# Altium footprint library Radolovic_PCB_Library.PcbLib: 38 footprints (part 1 of 3)
Each footprint in its own frame and in the unit in brackets; x right, y up, seen from the top. Pads: shape width x height; smd on the part's side, far side on the other; paste and mask are expansions set on the pad; w line width, h text height; cw(c..) or ccw(c..) is an arc to the next point about the centre after c.
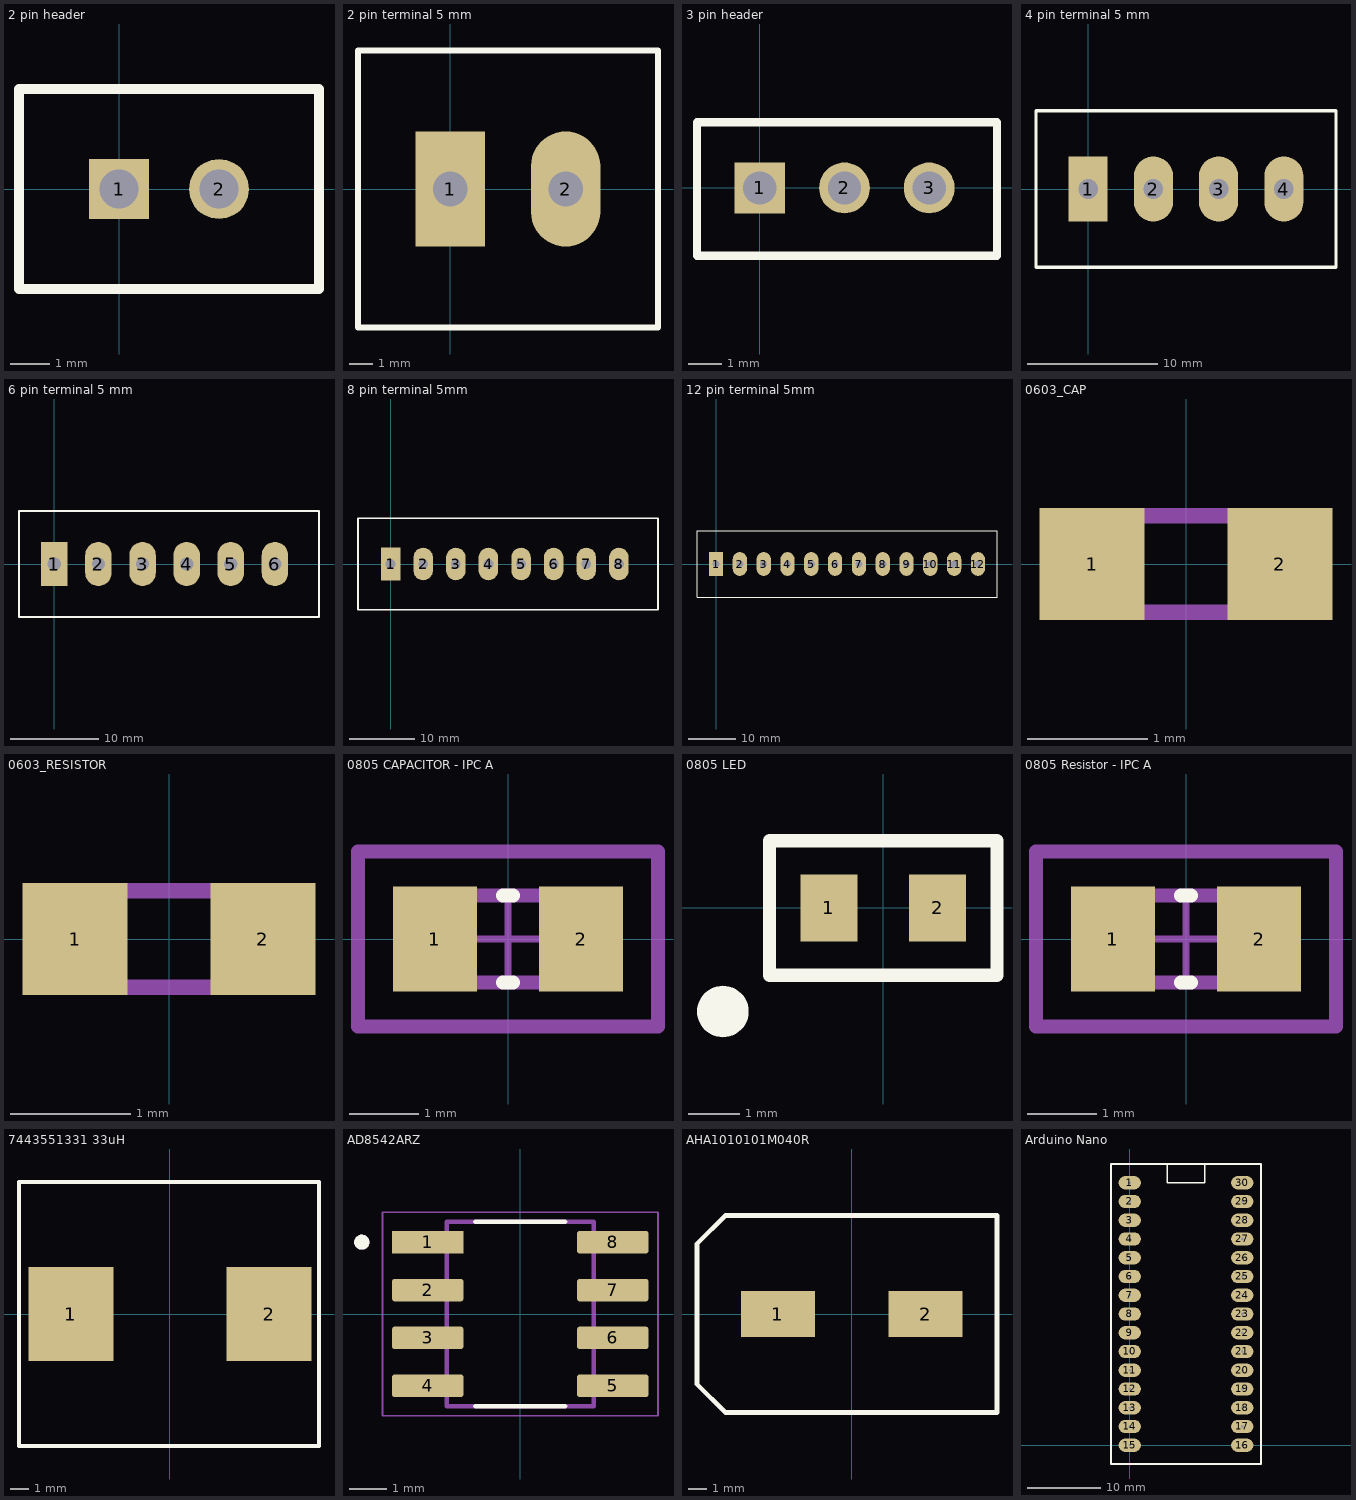
[diagram p0: the footprints below, top view; thin cyan lines are the x and y axes]

## 2 pin header [mil]
pads (2):
  rect 60x60 hole 39.37: 1(0,0)
  round 60 hole 39.37: 2(100,0)
Top Overlay:
  lines w10: -100,-100 200,-100 200,100 -100,100 -100,-100
3D body "MTSW-101-08-S-D-318.stp": height 418, standoff -112, extent -49.8,-49.8 150.2,50.2

## 2 pin terminal 5 mm [mm]
pads (2):
  rect 3x5 hole 1.5: 1(0,0)
  oval 3x5 hole 1.5: 2(5,0)
Top Overlay:
  lines w0.254: -4,-6 -4,6 9,6 9,-6 -4,-6
3D body "TB003-500-P02BE--3DModel-STEP-1.STEP": height 10.3, standoff -4, extent -3.05,-3.8 7.45,4

## 3 pin header [mil]
pads (3):
  rect 60x60 hole 39.37: 1(0,0)
  round 60 hole 39.37: 2(100,0) 3(200,0)
Top Overlay:
  lines w10: -74.02,-80 280,-80 280,77.48 -74.02,77.48 -74.02,-80
3D body "TSW-101-07-T-T.stp": height 37.01, standoff -392.99, extent -50,-50 250,50

## 4 pin terminal 5 mm [mm]
pads (4):
  rect 3x5 hole 1.5: 1(0,0)
  oval 3x5 hole 1.5: 2(5,0) 3(10,0) 4(15,0)
Top Overlay:
  lines w0.254: -4,-6 19,-6 19,6 -4,6 -4,-6

## 6 pin terminal 5 mm [mm] "6 pin terminal block 5 mm"
pads (6):
  rect 3x5 hole 1.5: 1(0,0)
  oval 3x5 hole 1.5: 2(5,0) 3(10,0) 4(15,0) 5(20,0) 6(25,0)
Top Overlay:
  lines w0.254: -4,-6 30,-6 30,6 -4,6 -4,-6
3D body "282856-6--3DModel-STEP-1.STEP": height 19.5, standoff -3, extent -2.55,-5 27.95,5

## 8 pin terminal 5mm [mm] "8 pin terminal block 5 mm"
pads (8):
  rect 3x5 hole 1.5: 1(0,0)
  oval 3x5 hole 1.5: 2(5,0) 3(10,0) 4(15,0) 5(20,0) 6(25,0) 7(30,0) 8(35,0)
Top Overlay:
  lines w0.254: -5,-7 41,-7 41,7 -5,7 -5,-7
3D body "282856-8--3DModel-STEP-1.STEP": height 19.5, standoff -3, extent -2.55,-5 37.95,5

## 12 pin terminal 5mm [mm] "12 pin terminal block 5 mm"
pads (12):
  rect 3x5 hole 1.5: 1(0,0)
  oval 3x5 hole 1.5: 2(5,0) 3(10,0) 4(15,0) 5(20,0) 6(25,0) 7(30,0) 8(35,0) 9(40,0) 10(45,0) 11(50,0) 12(55,0)
Top Overlay:
  lines w0.254: -4,-7 59,-7 59,7 -4,7 -4,-7

## 0603_CAP [mm]
pads (2):
  rect 0.87x0.93 smd: 1(-0.78,0) 2(0.78,0)
Mechanical 13:
  lines w0.127: -0.8,-0.4 -0.8,0.4 0.8,0.4 0.8,-0.4 -0.8,-0.4
3D body "step_temp.STEP": height 0.9, standoff 0, extent -0.8,-0.4 0.8,0.4

## 0603_RESISTOR [mm]
pads (2):
  rect 0.87x0.93 smd: 1(-0.78,0) 2(0.78,0)
Mechanical 13:
  lines w0.127: -0.8,-0.4 -0.8,0.4 0.8,0.4 0.8,-0.4 -0.8,-0.4
3D body "RN73C1J3K01BTG.STEP": height 0.55, standoff 0, extent -0.775,-0.4 0.775,0.4

## 0805 CAPACITOR - IPC A [mil]
pads (2):
  rect 47.5x59.38 smd paste+0: 1(-41.37,0) 2(41.37,0)
Top Overlay:
  lines w7.87: -2.86,-24.61 2.86,-24.61 ; -2.86,24.61 2.86,24.61
Top 3D Body:
  lines w7.87: -39.37,-24.61 -39.37,24.61 39.37,24.61 39.37,-24.61 -39.37,-24.61
Top Courtyard:
  lines w7.87: -84.81,-49.37 -84.81,49.37 84.81,49.37 84.81,-49.37 -84.81,-49.37
Top Assembly:
  lines w7.87: -84.81,-49.37 -84.81,49.37 84.81,49.37 84.81,-49.37 -84.81,-49.37
  text ".Designator" at 0,7.41 h39.37
Top Component Center:
  lines w3.94: -19.68,0 19.68,0 ; 0,-19.68 0,19.68
3D body "GRT21BC8YA225KE13L.STEP": height 48.23, standoff -0.98, extent -39.37,-28.54 39.37,28.54

## 0805 LED [mm] "Wurth Electronics  / 150080VS75000"
pads (3):
  rect 1.1x1.3 smd: 1(-1.05,0) 2(1.05,0)
  round 1 on Top Overlay: ""(-3.1,-2)
Top Overlay:
  lines w0.254: -2.2,-1.3 -2.2,1.3 2.2,1.3 2.2,-1.3 -2.2,-1.3
3D body "598-8160-102F.STEP": height 0.7, standoff 0, extent -1.05,-0.625 0.95,0.625

## 0805 Resistor - IPC A [mil]
pads (2):
  rect 47.5x59.38 smd paste+0: 1(-41.37,0) 2(41.37,0)
Top Overlay:
  lines w7.87: -2.86,-24.61 2.86,-24.61 ; -2.86,24.61 2.86,24.61
Top 3D Body:
  lines w7.87: -39.37,-24.61 39.37,-24.61 39.37,24.61 -39.37,24.61 -39.37,-24.61
Top Courtyard:
  lines w7.87: -84.81,-49.37 84.81,-49.37 84.81,49.37 -84.81,49.37 -84.81,-49.37
Top Assembly:
  lines w7.87: -84.81,-49.37 84.81,-49.37 84.81,49.37 -84.81,49.37 -84.81,-49.37
  text ".Designator" at 0,7.41 h39.37
Top Component Center:
  lines w3.94: -19.68,0 19.68,0 ; 0,-19.68 0,19.68
3D body "Res_Vishay_CRCW0805100KFKEA_eec.STEP": height 10, standoff 0, extent -84.81,-49.37 84.81,49.37

## 7443551331 33uH [mm] "Wurth Electronics 7443551331 33uH"
pads (2):
  rect 4.5x5 smd: 1(-5.25,0) 2(5.25,0)
Top Overlay:
  lines w0.2: -8,-7 -3.375,-7 3.475,-7 7.9,-7 7.9,7 -8,7 -8,0.625 -8,-7

## AD8542ARZ [mm] "AD8542ARZ / SOIC-8"
pads (8):
  rect 1.9x0.6 smd: 1(-2.455,1.905)
  rrect25% 1.9x0.6 smd: 2(-2.455,0.635) 3(-2.455,-0.635) 4(-2.455,-1.905) 5(2.455,-1.905) 6(2.455,-0.635) 7(2.455,0.635) 8(2.455,1.905)
Top Overlay:
  circle w0.2: c-4.205,1.905 r0.1
  lines w0.127: -1.185,-2.45 1.185,-2.45 ; -1.185,2.45 1.185,2.45
Mechanical 13:
  circle w0.2: c-4.205,1.905 r0.1
  lines w0.127: -1.95,-2.45 -1.95,2.45 1.95,2.45 1.95,-2.45 -1.95,-2.45
Mechanical 15:
  lines w0.05: -3.655,-2.7 3.655,-2.7 3.655,2.7 -3.655,2.7 -3.655,-2.7
3D body "AD8542ARZ.STEP": height 1.75, standoff 0, extent -2.975,-2.45 3.025,2.45

## AHA1010101M040R [mm]
pads (2):
  rect 4x2.5 smd: 1(-4,0) 2(4,0)
Top Overlay:
  lines w0.254: -8.382,-3.81 -8.382,3.302 -8.382,3.81 -6.858,5.334 -6.35,5.334 7.874,5.334 7.874,-5.334 -6.858,-5.334 -8.382,-3.81

## Arduino Nano [mm]
pads (30):
  oval 3x1.8 hole 0.4: 1(0,35.56) 2(0,33.02) 3(0,30.48) 4(0,27.94) 5(0,25.4) 6(0,22.86) 7(0,20.32) 8(0,17.78) 9(0,15.24) 10(0,12.7) 11(0,10.16) 12(0,7.62) 13(0,5.08) 14(0,2.54) 15(0,0) 16(15.24,0) 17(15.24,2.54) 18(15.24,5.08) 19(15.24,7.62) 20(15.24,10.16) 21(15.24,12.7) 22(15.24,15.24) 23(15.24,17.78) 24(15.24,20.32) 25(15.24,22.86) 26(15.24,25.4) 27(15.24,27.94) 28(15.24,30.48) 29(15.24,33.02) 30(15.24,35.56)
Top Overlay:
  lines w0.254: -2.54,-2.54 -2.54,38.1 17.78,38.1 17.78,-2.54 -2.54,-2.54 ; 5.08,35.56 10.16,35.56 10.16,38.1 5.08,38.1 5.08,35.56